# Altium footprint library Capacitores.PcbLib: 30 footprints (part 2 of 2)
Each footprint in its own frame and in the unit in brackets; x right, y up, seen from the top. Pads: shape width x height; smd on the part's side, far side on the other; paste and mask are expansions set on the pad; w line width, h text height; cw(c..) or ccw(c..) is an arc to the next point about the centre after c.
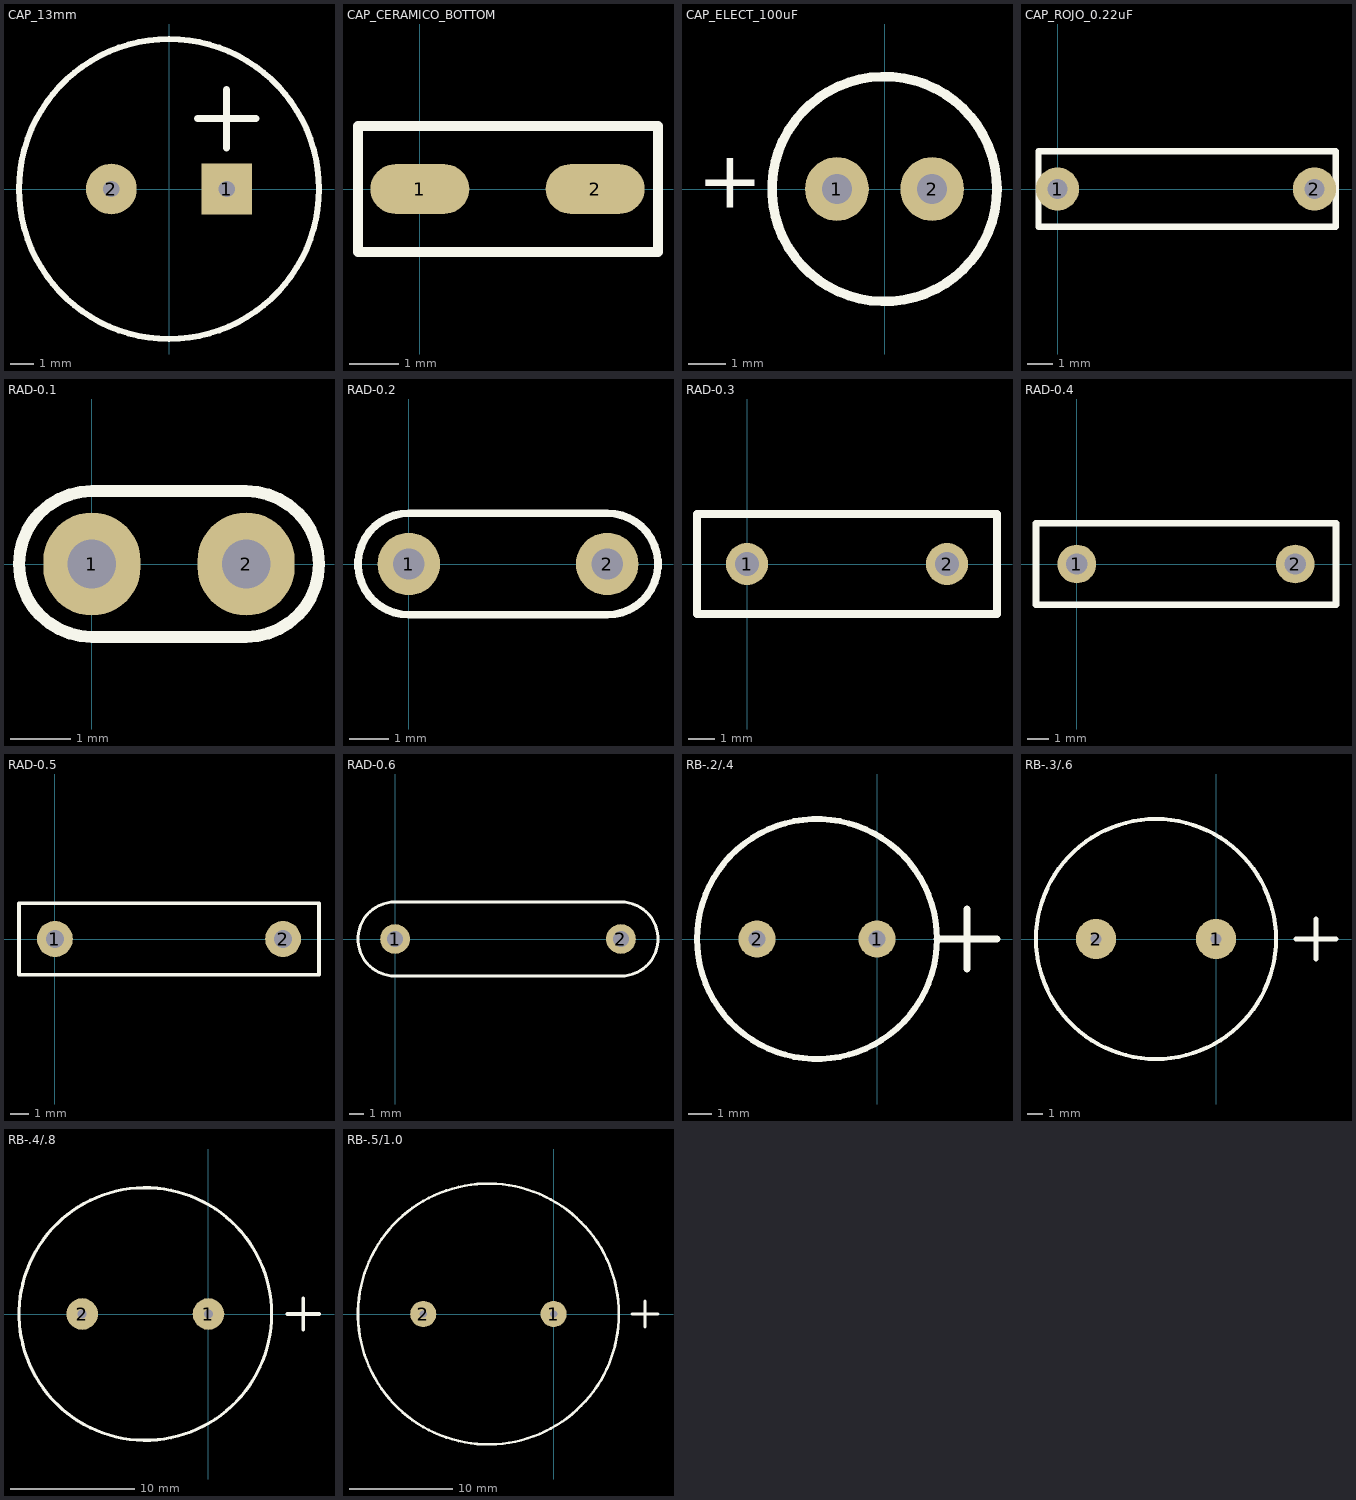
[diagram p1: the footprints below, top view; thin cyan lines are the x and y axes]

## CAP_13mm [mm]
pads (2):
  rect 2.2x2.2 hole 0.7: 1(2.5,0)
  round 2.2 hole 0.7: 2(-2.5,0)
Top Overlay:
  circle w0.254: c0,0 r6.5
  lines w0.305: 1.23,3.048 3.77,3.048 ; 2.5,1.778 2.5,4.318
Mechanical 1:
  circle w0.02: c0,0 r6.5

## CAP_CERAMICO_BOTTOM [mm] "Radial Cap, Thru-Hole; 2 Leads; 0.1 in Pin Spacing"
pads (2):
  oval 2x1 smd: 1(0,0) 2(3.54,0)
Top Overlay:
  lines w0.2: -1.25,-1.27 -1.25,1.27 4.81,1.27 4.81,-1.27 -1.25,-1.27

## CAP_ELECT_100uF [mm]
pads (2):
  round 1.7 hole 0.8: 1(-1.27,0) 2(1.27,0)
Top Overlay:
  circle w0.254: c0,0 r3
  text "+" at -5,-0.5 h1.52

## CAP_ROJO_0.22uF [mm]
pads (2):
  round 1.7 hole 0.8: 1(0,0) 2(10.16,0)
Top Overlay:
  lines w0.254: -0.75,-1.5 -0.75,1.5 11,1.5 11,-1.5 -0.75,-1.5

## RAD-0.1 [mm] "CAPACITOR CERAMICO"
pads (2):
  oval 1.6x1.7 hole 0.8: 1(0,0) 2(2.54,0)
Top Overlay:
  lines w0.2: 0,-1.2 cw(c0,0) 0,1.2 2.54,1.2 cw(c2.54,0) 2.54,-1.2 0,-1.2
3D body "User Library-Cer-Cap2 (3_5x1_5).STEP": height 3.5, standoff -3, extent -0.48,-0.75 3.02,0.751

## RAD-0.2 [mm]
pads (2):
  round 1.6 hole 0.8: 1(0,0) 2(5.08,0)
Top Overlay:
  lines w0.2: 0,-1.3 cw(c0,0) 0,1.3 5.08,1.3 cw(c5.08,0) 5.08,-1.3 0,-1.3
3D body "User Library-Ceramic Disc Capacitor 0_2in pitch.STEP": height 7, standoff -1.5, extent -0.959,-0.828 6.04,0.868

## RAD-0.3 [mm]
pads (2):
  round 1.6 hole 0.9: 1(0,0) 2(7.62,0)
Top Overlay:
  lines w0.305: -1.905,-1.905 -1.905,1.905 9.525,1.905 9.525,-1.905 -1.905,-1.905

## RAD-0.4 [mm]
pads (2):
  round 1.8 hole 1: 1(0,0) 2(10.16,0)
Top Overlay:
  lines w0.305: -1.905,-1.905 12.065,-1.905 12.065,1.905 -1.905,1.905 -1.905,-1.905

## RAD-0.5 [mm]
pads (2):
  round 2 hole 1: 1(0,0) 2(12.7,0)
Top Overlay:
  lines w0.2: -2,-2 -2,2 0,2 12.7,2 14.7,2 14.7,-2 12.7,-2 0,-2 -2,-2

## RAD-0.6 [mm]
pads (2):
  round 2 hole 1.1: 1(0,0) 2(15.24,0)
Top Overlay:
  lines w0.2: 0,-2.5 cw(c0,0) 0,2.5 15.24,2.5 cw(c15.24,0) 15.24,-2.5 0,-2.5

## RB-.2/.4 [mil]
pads (2):
  round 62 hole 28: 1(0,0) 2(-200,0)
Top Overlay:
  circle w10: c-100,0 r200
  lines w12: 100,0 200,0 ; 150,-50 150,50

## RB-.3/.6 [mil]
pads (2):
  round 100 hole 28: 1(0,0) 2(-300,0)
Top Overlay:
  circle w10: c-150,0 r300
  lines w12: 200,0 300,0 ; 250,-50 250,50

## RB-.4/.8 [mil]
pads (2):
  round 100 hole 28: 1(0,0) 2(-400,0)
Top Overlay:
  circle w10: c-200,0 r400
  lines w12: 250,0 350,0 ; 300,-50 300,50

## RB-.5/1.0 [mil]
pads (2):
  round 100 hole 28: 1(0,0) 2(-500,0)
Top Overlay:
  circle w10: c-250,0 r500
  lines w12: 300,0 400,0 ; 350,-50 350,50